# Altium integrated library ERA6AED510V.IntLib: 1 symbol
Pins are listed as number, name and electrical type; pins without a type are passive.

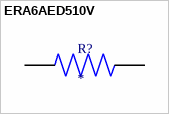
[diagram p0: symbol ERA6AED510V]

## ERA6AED510V
designator R?
MP: ERA6AED510V; Availability: Unavailable; Value: *; Price: None; Package: None
footprint RES_ERA6AED510V
pins: 1, 2